# Altium schematic symbol library KY-383-PM-DB27408.SchLib: 2 symbols
Pins are listed as number, name and electrical type; pins without a type are passive.

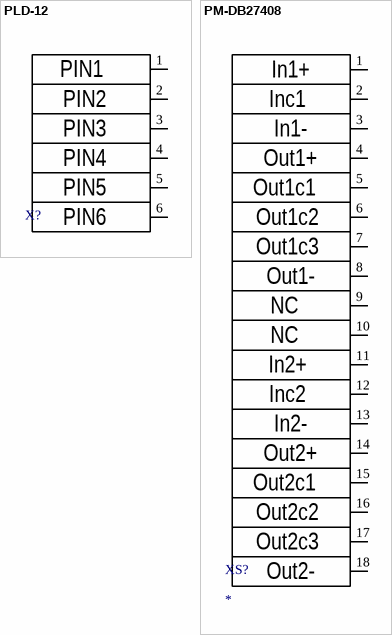
[diagram p0: symbols PLD-12 to PM-DB27408]

## PLD-12
designator X?  (value not drawn)
footprint PLD-12 (KUPPLS)
pins: 1, 2, 3, 4, 5, 6
text: PIN1; PIN2; PIN3; PIN4; PIN5; PIN6

## PM-DB27408
designator XS?
footprint 7H
pins: 1, 2, 3, 4, 5, 6, 7, 8, 9, 10, 11, 12, 13, 14, 15, 16, 17, 18
text: In1+; Inc1; In1-; Out1+; Out1c1; Out1c2; Out1c3; Out1-; NC; In2+; Inc2; In2-; Out2+; Out2c1; Out2c2; Out2c3; Out2-